# Altium schematic symbol library Anten-Tracker.SchLib: 36 symbols
Pins are listed as number, name and electrical type; pins without a type are passive.

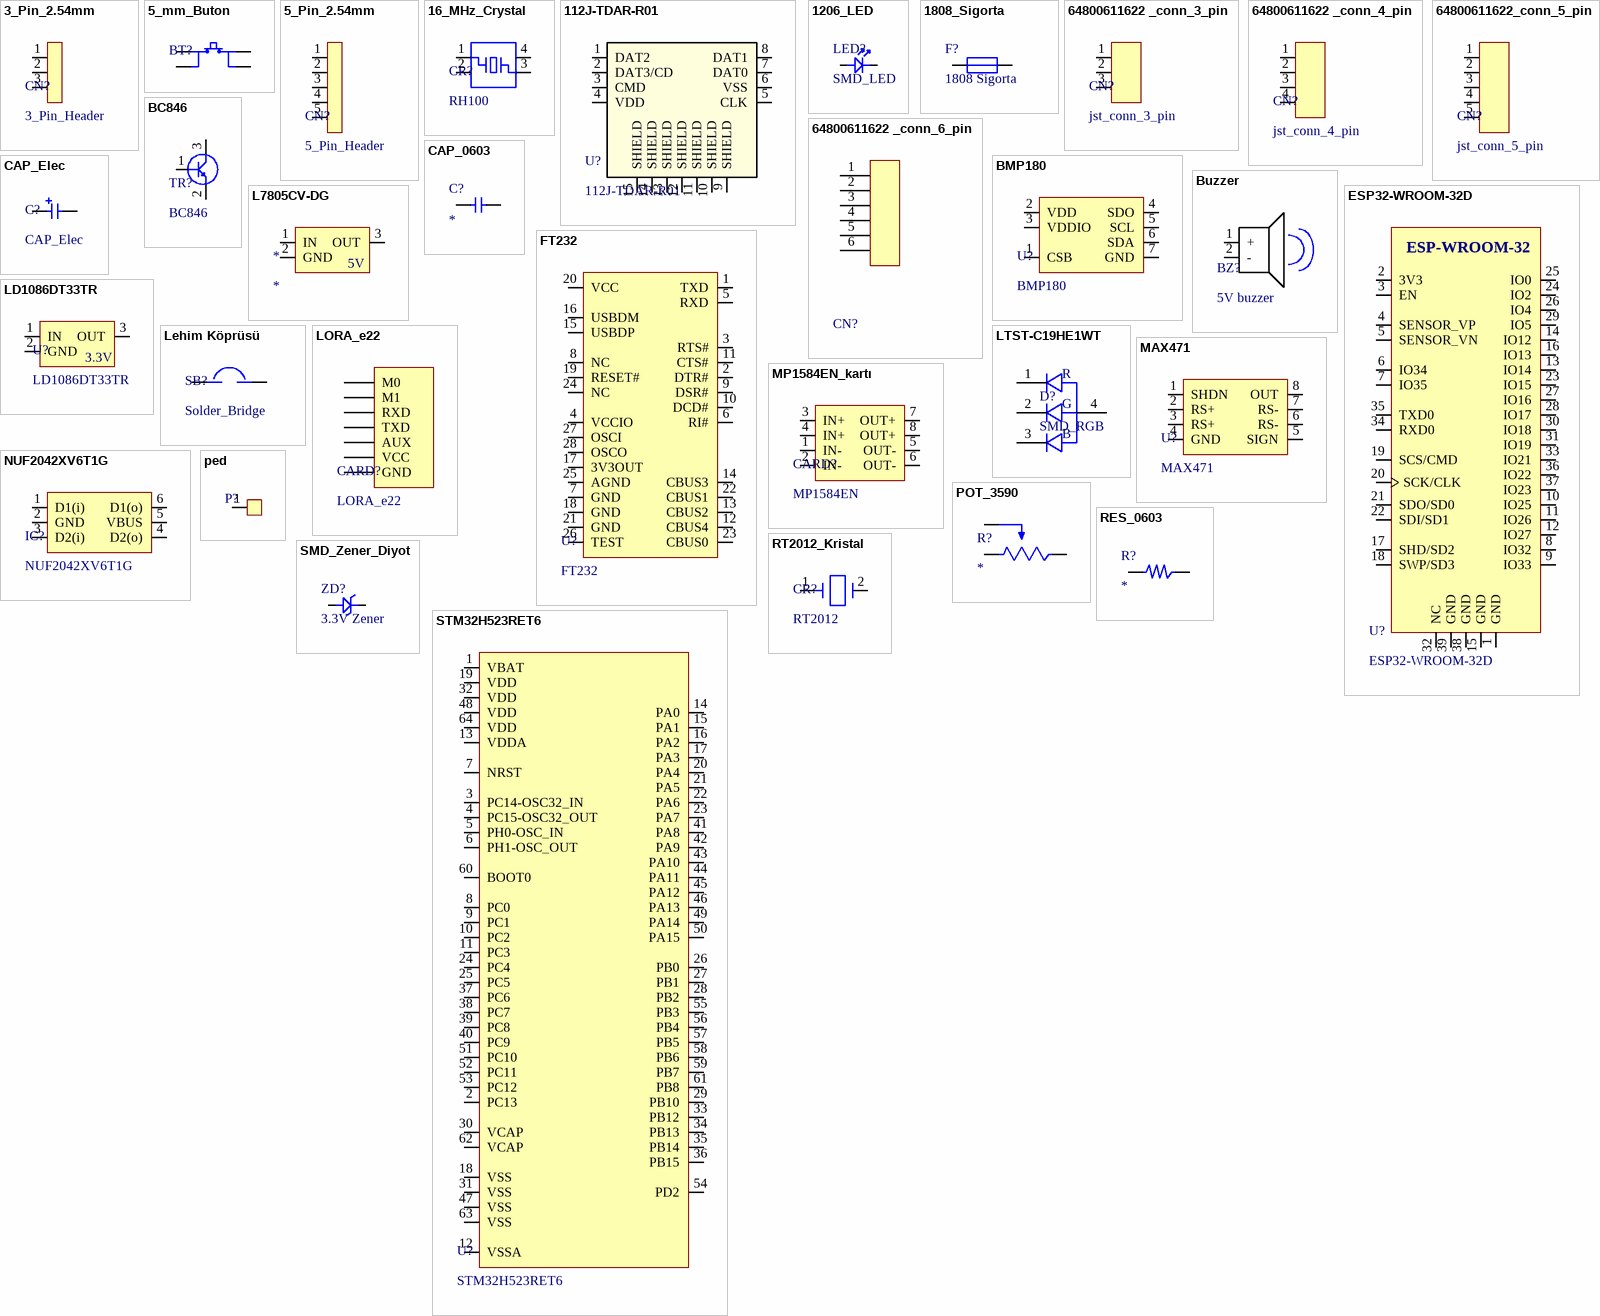
[diagram p0: symbols 3_Pin_2.54mm to STM32H523RET6]

## 3_Pin_2.54mm
designator CN?, comment 3_Pin_Header
footprint 3_PIN_HEADER
pins: 1, 2, 3

## 5_mm_Buton
designator BT?  (value not drawn)
footprint 5mm_buton
pins: 1, 2, 3, 4

## 5_Pin_2.54mm
designator CN?, comment 5_Pin_Header
footprint 5_PIN_HEADER
pins: 1, 2, 3, 4, 5

## 16_MHz_Crystal
designator CR?, comment RH100
footprint RH100
pins: 1, 2, 3, 4

## 112J-TDAR-R01
designator U?
Description; Manufacturer_Name: Attend; Copyright: Copyright (C) 2025 Ultra Librarian. All rights reserved.; Manufacturer_Part_Number: 112J-TDAR-R01; RefDes: RefDes; Type: Type
footprint 112J-TDAR-R01_ATT
pins: 1 DAT2, 2 DAT3/CD, 3 CMD, 4 VDD, 5 CLK, 6 VSS, 7 DAT0, 8 DAT1, 9 SHIELD, 10 SHIELD, 11 SHIELD, 12 SHIELD, 13 SHIELD, 14 SHIELD, 15 SHIELD

## 1206_LED
designator LED?, comment SMD_LED
footprint 1206_LED
pins: 1, 2

## 1808_Sigorta
designator F?, comment 1808 Sigorta
footprint 1808_Sigorta
pins: 1, 2

## 64800611622 _conn_3_pin
designator CN?, comment jst_conn_3_pin
footprint 64800611622_conn_3_pin
pins: 1, 2, 3

## 64800611622 _conn_4_pin
designator CN?, comment jst_conn_4_pin
footprint 64800611622 _conn_4_pin
pins: 1, 2, 3, 4

## 64800611622 _conn_6_pin
designator CN?, comment jst_conn_6_pin  (value not drawn)
footprint 64800611622_conn_6_pin
pins: 1, 2, 3, 4, 5, 6

## 64800611622_conn_5_pin
designator CN?, comment jst_conn_5_pin
footprint 64800611622_CONN_5_PIN
pins: 1, 2, 3, 4, 5

## BC846
designator TR?
footprint SOT-23
pins: 1 G, 2 G, 3 G

## BMP180
designator U?
footprint BMP180
pins: 1 CSB, 2 VDD, 3 VDDIO, 4 SDO, 5 SCL, 6 SDA, 7 GND

## Buzzer
designator BZ?, comment 5V buzzer
footprint 5v buzer
pins: 1 +, 2 -

## CAP_0603
designator C?  (value not drawn)
Value: *
footprint CAP_0603
pins: 1, 2

## CAP_Elec
designator C?
Value: *
footprint CAP_Elec
pins: 1, 2

## ESP32-WROOM-32D
designator U?
Bluetooth, WiFi 802.11b/g/n, Bluetooth v4.2 +EDR, Class 1, 2 and 3 Transceiver Module 2.4GHz ~ 2.5GHz Integrated; MF: Espressif Systems; SnapEDA_Link: https://www.snapeda.com/parts/ESP32-WROOM-32D/Espressif+Systems/view-part/?ref=snap; Package: Non Standard Espressif Systems; Value: *; MP: ESP32-WROOM-32D; Check_prices: https://www.snapeda.com/parts/ESP32-WROOM-32D/Espressif+Systems/view-part/?ref=eda
footprint MODULE_ESP32-WROOM-32D
pins: 1 GND, 2 3V3, 3 EN, 4 SENSOR_VP, 5 SENSOR_VN, 6 IO34, 7 IO35, 8 IO32, 9 IO33, 10 IO25, 11 IO26, 12 IO27, 13 IO14, 14 IO12, 15 GND, 16 IO13, 17 SHD/SD2, 18 SWP/SD3, 19 SCS/CMD, 20 SCK/CLK, 21 SDO/SD0, 22 SDI/SD1, 23 IO15, 24 IO2, 25 IO0, 26 IO4, 27 IO16, 28 IO17, 29 IO5, 30 IO18, 31 IO19, 32 NC, 33 IO21, 34 RXD0, 35 TXD0, 36 IO22, 37 IO23, 38 GND, 39 GND
text: ESP-WROOM-32

## FT232
designator U?
footprint SSOP-28
pins: 1 TXD, 2 DTR#, 3 RTS#, 4 VCCIO, 5 RXD, 6 RI#, 7 GND, 8 NC, 9 DSR#, 10 DCD#, 11 CTS#, 12 CBUS4, 13 CBUS2, 14 CBUS3, 15 USBDP, 16 USBDM, 17 3V3OUT, 18 GND, 19 RESET#, 20 VCC, 21 GND, 22 CBUS1, 23 CBUS0, 24 NC, 25 AGND, 26 TEST, 27 OSCI, 28 OSCO

## L7805CV-DG
designator *
footprint TO255
pins: 1 IN, 2 GND, 3 OUT
text: 5V

## LD1086DT33TR
designator U?
footprint DPAK
pins: 1 IN, 2 GND, 3 OUT
text: 3.3V

## Lehim Köprüsü
designator SB?, comment Solder_Bridge
footprint Solder_Bridge
pins: 1, 2

## LORA_e22
designator CARD?
footprint LORA e22
pins: 1 M0, 2 M1, 3 RXD, 4 TXD, 5 AUX, 6 VCC, 7 GND

## LTST-C19HE1WT
designator D?, comment SMD_RGB
Red, Green, Blue (RGB) 624nm Red, 525nm Green, 470nm Blue LED Indication - Discrete 2.1V Red, 3.35V Green, 3.35V Blue 0606 (1616 Metric); MF: Lite-On Inc.; MP: LTST-C19HE1WT; SnapEDA_Link: https://www.snapeda.com/parts/LTST-C19HE1WT/Lite-On/view-part/?ref=snap; Package: 0606 Lite-On; Value: *; Check_prices: https://www.snapeda.com/parts/LTST-C19HE1WT/Lite-On/view-part/?ref=eda
footprint LED_LTST-C19HE1WT
pins: 1, 2, 3, 4
text: R; G; B

## MAX471
designator U?
footprint SOIC-8
pins: 1 SHDN, 2 RS+, 3 RS+, 4 GND, 5 SIGN, 6 RS-, 7 RS-, 8 OUT

## MP1584EN_kartı
designator CARD?, comment MP1584EN
footprint MP1584
pins: 1 IN-, 2 IN-, 3 IN+, 4 IN+, 5 OUT-, 6 OUT-, 7 OUT+, 8 OUT+

## NUF2042XV6T1G
designator IC?
footprint SOT-563-6
pins: 1 D1(i), 2 GND, 3 D2(i), 4 D2(o), 5 VBUS, 6 D1(o)

## ped
designator P?  (value not drawn)
footprint ped
pins: 1

## POT_3590
designator R?  (value not drawn)
Value: *
footprint POT_3590
pins: 1, 2, 3

## RES_0603
designator R?  (value not drawn)
Value: *
footprint RES_0603
pins: 1, 2

## RT2012_Kristal
designator CR?, comment RT2012
footprint RT2012
pins: 1, 2

## SMD_Zener_Diyot
designator ZD?, comment 3.3V Zener
footprint SOD-123
pins: 1, 2

## STM32H523RET6
designator U?
footprint LQFP64_STM
pins: 1 VBAT, 2 PC13, 3 PC14-OSC32_IN, 4 PC15-OSC32_OUT, 5 PH0-OSC_IN, 6 PH1-OSC_OUT, 7 NRST, 8 PC0, 9 PC1, 10 PC2, 11 PC3, 12 VSSA, 13 VDDA, 14 PA0, 15 PA1, 16 PA2, 17 PA3, 18 VSS, 19 VDD, 20 PA4, 21 PA5, 22 PA6, 23 PA7, 24 PC4, 25 PC5, 26 PB0, 27 PB1, 28 PB2, 29 PB10, 30 VCAP, 31 VSS, 32 VDD, 33 PB12, 34 PB13, 35 PB14, 36 PB15, 37 PC6, 38 PC7, 39 PC8, 40 PC9, 41 PA8, 42 PA9, 43 PA10, 44 PA11, 45 PA12, 46 PA13, 47 VSS, 48 VDD, 49 PA14, 50 PA15, 51 PC10, 52 PC11, 53 PC12, 54 PD2, 55 PB3, 56 PB4, 57 PB5, 58 PB6, 59 PB7, 60 BOOT0, 61 PB8, 62 VCAP, 63 VSS, 64 VDD

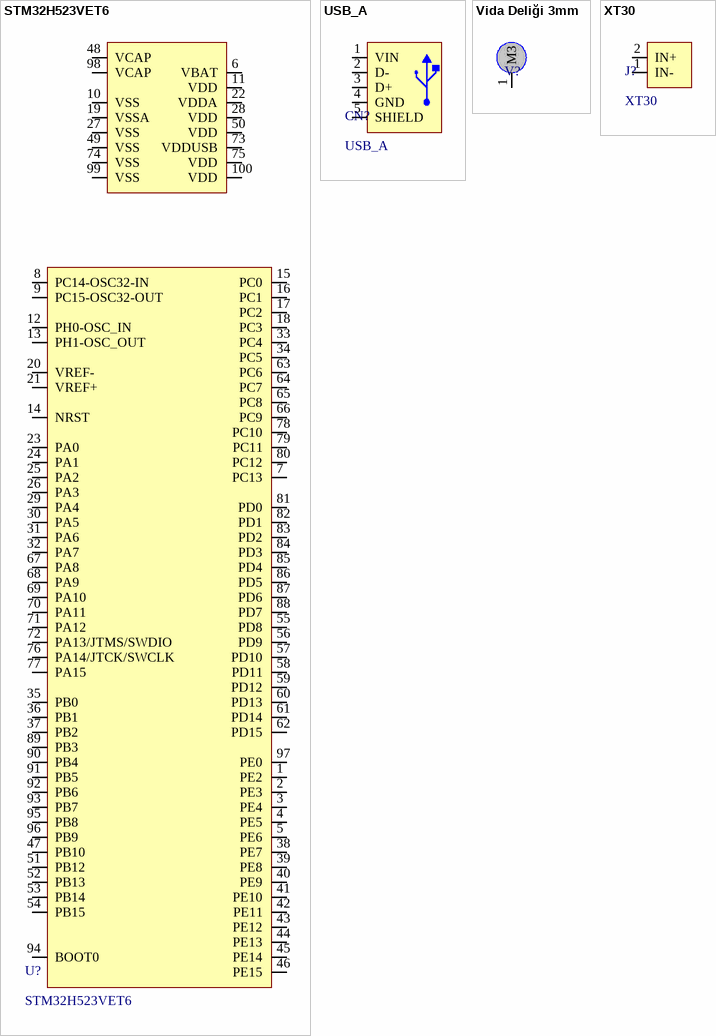
[diagram p1: symbols STM32H523VET6 to XT30]

## STM32H523VET6
designator U?
footprint LQFP100
pins: 1 PE2, 2 PE3, 3 PE4, 4 PE5, 5 PE6, 6 VBAT, 7 PC13, 8 PC14-OSC32-IN, 9 PC15-OSC32-OUT, 10 VSS, 11 VDD, 12 PH0-OSC_IN, 13 PH1-OSC_OUT, 14 NRST, 15 PC0, 16 PC1, 17 PC2, 18 PC3, 19 VSSA, 20 VREF-, 21 VREF+, 22 VDDA, 23 PA0, 24 PA1, 25 PA2, 26 PA3, 27 VSS, 28 VDD, 29 PA4, 30 PA5, 31 PA6, 32 PA7, 33 PC4, 34 PC5, 35 PB0, 36 PB1, 37 PB2, 38 PE7, 39 PE8, 40 PE9, 41 PE10, 42 PE11, 43 PE12, 44 PE13, 45 PE14, 46 PE15, 47 PB10, 48 VCAP, 49 VSS, 50 VDD, 51 PB12, 52 PB13, 53 PB14, 54 PB15, 55 PD8, 56 PD9, 57 PD10, 58 PD11, 59 PD12, 60 PD13, 61 PD14, 62 PD15, 63 PC6, 64 PC7, 65 PC8, 66 PC9, 67 PA8, 68 PA9, 69 PA10, 70 PA11, 71 PA12, 72 PA13/JTMS/SWDIO, 73 VDDUSB, 74 VSS, 75 VDD, 76 PA14/JTCK/SWCLK, 77 PA15, 78 PC10, 79 PC11, 80 PC12, 81 PD0, 82 PD1, 83 PD2, 84 PD3, 85 PD4, 86 PD5, 87 PD6, 88 PD7, 89 PB3, 90 PB4, 91 PB5, 92 PB6, 93 PB7, 94 BOOT0, 95 PB8, 96 PB9, 97 PE0, 98 VCAP, 99 VSS, 100 VDD

## USB_A
designator CN?
footprint USB_A
pins: 1 VIN, 2 D-, 3 D+, 4 GND, 5 SHIELD

## Vida Deliği 3mm
designator V?  (value not drawn)
footprint m3_vide_deliği
pins: 1 M3

## XT30
designator J?
footprint XT30
pins: 1 IN-, 2 IN+